# Altium schematic symbol library Diode%.SchLib: 376 symbols (part 1 of 9)
Pins are listed as number, name and electrical type; pins without a type are passive.

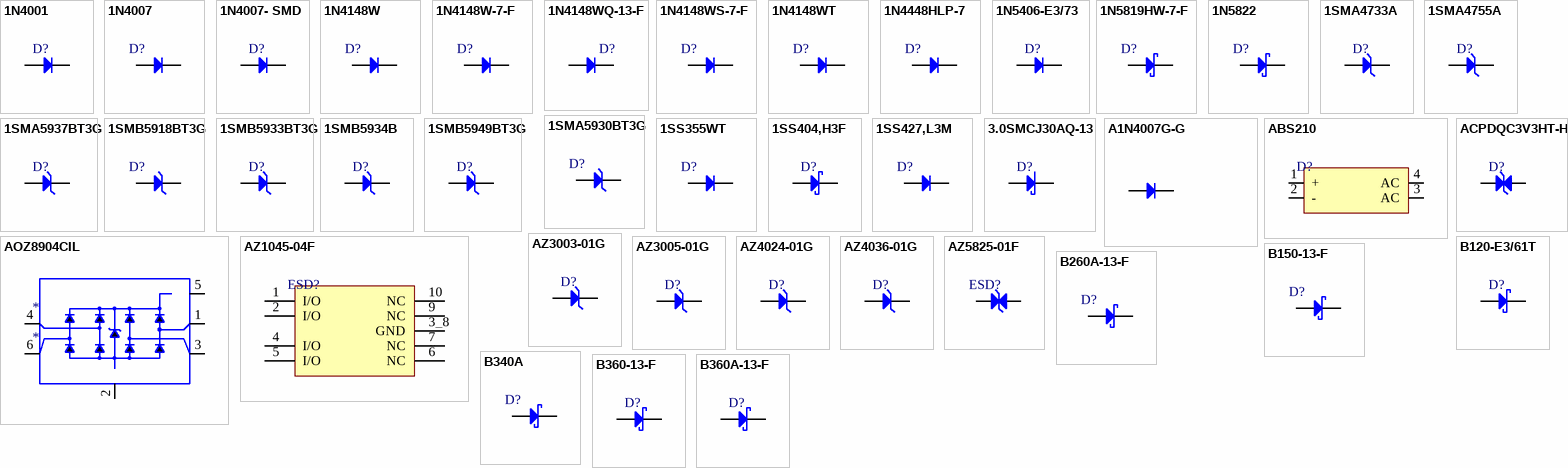
[diagram p0: symbols 1N4001 to B360A-13-F]

## 1N4001
designator D?
1A Single 50V 1.1V@1A SMA(DO-214AC) Diodes - General Purpose ROHS; Manufacturer: TWGMC; Manufacturer Part Number: 1N4001; Item Type: Diode; Package: SMA(DO-214AC); LCSC Part Number: C727079; ComponentLink1Description: LCSC; ComponentLink1URL: https://www.lcsc.com/product-detail/Diodes-General-Purpose_TWGMC-1N4001_C727079.html
footprint SMA(DO-214AC)
pins: 1 K, 2 A

## 1N4007
designator D?
1A 1000V 1.1V@2A DO-41 Diodes - General Purpose ROHS; Manufacturer: JUXING; Manufacturer Part Number: 1N4007; Item Type: Diode; Package: DO-41; LCSC Part Number: C3011149; ComponentLink1Description: LCSC; ComponentLink1URL: https://www.lcsc.com/product-detail/Diodes-General-Purpose_JUXING-1N4007_C3011149.html
footprint DO-41
pins: 1 A, 2 K

## 1N4007- SMD
designator D?
1A Single 1kV 1.1V@1A SMA(DO-214AC) Diodes - General Purpose ROHS; Manufacturer: TWGMC; Manufacturer Part Number: 1N4007; Item Type: Diode; Package: SMA(DO-214AC); LCSC Part Number: C727081; ComponentLink1Description: LCSC; ComponentLink1URL: https://www.lcsc.com/product-detail/Diodes-General-Purpose_TWGMC-1N4007_C727081.html
footprint SMA(DO-214AC)
pins: 1 K, 2 A

## 1N4148W
designator D?
100V 400mW Single 1.25V@150mA 8ns 300mA SOD-123 Switching Diode ROHS; Manufacturer: JSMSEMI; Manufacturer Part Number: 1N4148W; ComponentLink1Description: LCSC; ComponentLink1URL: https://www.lcsc.com/product-detail/Switching-Diode_JSMSEMI-1N4148W_C917030.html; Package: SOD-123; LCSC Part Number: C917030; Item Type: Diode
footprint SOD-123
pins: 1 A, 2 K

## 1N4148W-7-F
designator D?
DIODE GEN PURP 100V 300MA SOD123; Manufacturer: Diodes; Manufacturer Part Number: 1N4148W-7-F; Forward Current: 150mA; Reverse Recovery Time: 4ns; Max Forward Surge Current (Ifsm): 2A; Element Configuration: Single; Max Reverse Current: 1uA; Forward Voltage: 1.25V; Power Dissipation: 400mW; Polarity: Standard; Voltage Rating (DC): 75V; Value: 2pF; Supplier 1: Future Electronics; RoHS: Yes; Category: Rectifier Diodes; Stock 1: 32931000; Pricing 1: 3000=0.01840, 12000=0.01760, 45000=0.01690, 120000=0.01640, 300000=0.01560 (USD); Mounting Technology: Surface Mount; Pins: 2; Weight: 0.000353oz; Contact Plating: Tin,Matte; Min Operating Temperature: -65°C; Max Operating Temperature: 150°C; Packaging: Tape and Reel; Max Repetitive Reverse Voltage (Vrrm): 100V; Peak Non-Repetitive Surge Current: 2A; Voltage: 100V; Max Surge Current: 2A; Package Quantity: 3000; Recovery Time: 4ns; Average Rectified Current: 300mA; Power Rating: 400mW; Current Rating: 150mA; Output Current: 150mA; Max Reverse Voltage (DC): 100V; Series: -; Reverse Recovery Time-Max: 4ns; Length: 2.85mm; Width: 1.7mm; Height: 1.25mm; Radiation Hardening: No; RoHS Compliant: Yes; Reach SVHC Compliant: Yes; Lead Free: Lead Free; ComponentLink1URL: https://datasheet.ciiva.com/1179/1915529-1179304.pdf?src-supplier=Element14; ComponentLink1Description: https://datasheet.ciiva.com/1179/1915529-1179304.pdf?src-supplier=Element14; ComponentLink2URL: https://datasheet.ciiva.com/22695/1915529-22695239.pdf?src-supplier=Element14; ComponentLink2Description: https://datasheet.ciiva.com/22695/1915529-22695239.pdf?src-supplier=Element14; ComponentLink3URL: https://datasheet.ciiva.com/8300/ds30086-8300392.pdf?src-supplier=Avnet; ComponentLink3Description: https://datasheet.ciiva.com/8300/ds30086-8300392.pdf?src-supplier=Avnet; ComponentLink4URL: https://datasheet.ciiva.com/15219/getdatasheetpartid-110030-15219548.pdf?src-supplier=Verical; ComponentLink4Description: https://datasheet.ciiva.com/15219/getdatasheetpartid-110030-15219548.pdf?src-supplier=Verical; ComponentLink5URL: https://datasheet.ciiva.com/8303/ds30086-8303197.pdf?src-supplier=Avnet; ComponentLink5Description: https://datasheet.ciiva.com/8303/ds30086-8303197.pdf?src-supplier=Avnet; ComponentLink6URL: https://datasheet.ciiva.com/911/ds30086-911735.pdf?src-supplier=Digi-Key; ComponentLink6Description: https://datasheet.ciiva.com/911/ds30086-911735.pdf?src-supplier=Digi-Key; ComponentLink7URL: https://datasheet.ciiva.com/911/ds30086-911736.pdf?src-supplier=Digi-Key; ComponentLink7Description: https://datasheet.ciiva.com/911/ds30086-911736.pdf?src-supplier=Digi-Key; ComponentLink8URL: https://datasheet.ciiva.com/911/ds30086-911734.pdf?src-supplier=Digi-Key; ComponentLink8Description: https://datasheet.ciiva.com/911/ds30086-911734.pdf?src-supplier=Digi-Key; ComponentLink9URL: https://datasheet.ciiva.com/4435/ds30086-4435128.pdf?src-supplier=Mouser; ComponentLink9Description: https://datasheet.ciiva.com/4435/ds30086-4435128.pdf?src-supplier=Mouser; Supplier Part Number 1: 7634694; LCSC Part Number: C83528; Item Type: Diode
footprint SOD-123
pins: 1 A, 2 K

## 1N4148WQ-13-F
designator D?
DIODE GP 100V 300MA SOD123 10K; Item Type: DIODE; ComponentLink1Description: LCSC; Supplier: Future Electronics; Supplier Part Number: 5129355; RoHS: Yes; Category: Rectifier Diodes; Stock: 20000; Pricing: 10000=0.0247, 30000=0.0239, 40000=0.0236, 100000=0.023, 150000=0.0223 (USD); RoHS Compliant: Yes
footprint SOD-123
pins: 1 A, 2 K

## 1N4148WS-7-F
designator D?
DIODE GEN PURP 75V 150MA SOD323; Manufacturer: Diodes; Manufacturer Part Number: 1N4148WS-7-F; Forward Current: 300mA; Reverse Recovery Time: 4ns; Element Configuration: Single; Forward Voltage: 1.25V; Max Reverse Current: 1uA; Peak Non-Repetitive Surge Current: 2A; Power Dissipation: 200mW; Polarity: Standard; Capacitance: 2pF; Supplier 1: Mouser; RoHS: Yes; Category: Rectifier Diodes; Pricing 1: 1=0.19000, 10=0.17500, 50=0.17500, 100=0.09600, 500=0.05900, 1000=0.04000, 3000=0.03000, 9000=0.02600, 10000=0.02600, 24000=0.02300, 45000=0.01900 (USD); Mount: Surface Mount; Number of Pins: 2; Weight: 0.000173oz; Contact Plating: Tin,Matte; Min Operating Temperature: -65°C; Max Operating Temperature: 150°C; Max Repetitive Reverse Voltage (Vrrm): 75V; Max Forward Surge Current (Ifsm): 2A; Max Surge Current: 2A; Packaging: Tape and Reel; Recovery Time: 4ns; Package Quantity: 3000; Average Rectified Current: 150mA; Voltage Rating (DC): 75V; Power Rating: 200mW; Current Rating: 150mA; Output Current: 150mA; Voltage: 75V; Max Reverse Voltage (DC): 75V; Series: -; Reverse Recovery Time-Max: 4ns; Length: 1.8mm; Width: 1.4mm; Height: 1mm; Radiation Hardening: No; REACH SVHC: No SVHC; Lead Free: Lead Free; RoHS Compliant: Yes; ComponentLink1URL: https://datasheet.ciiva.com/1179/ds30097-1179355.pdf?src-supplier=Element14; ComponentLink1Description: https://datasheet.ciiva.com/1179/ds30097-1179355.pdf?src-supplier=Element14; ComponentLink2URL: https://datasheet.ciiva.com/8300/ds30097-8300396.pdf?src-supplier=Avnet; ComponentLink2Description: https://datasheet.ciiva.com/8300/ds30097-8300396.pdf?src-supplier=Avnet; ComponentLink3URL: https://datasheet.ciiva.com/16199/ds30097-16199061.pdf?src-supplier=Future+Electronics; ComponentLink3Description: https://datasheet.ciiva.com/16199/ds30097-16199061.pdf?src-supplier=Future+Electronics; ComponentLink4URL: https://datasheet.ciiva.com/911/ds30097-911742.pdf?src-supplier=Digi-Key; ComponentLink4Description: https://datasheet.ciiva.com/911/ds30097-911742.pdf?src-supplier=Digi-Key; ComponentLink5URL: https://datasheet.ciiva.com/911/ds30097-911743.pdf?src-supplier=Digi-Key; ComponentLink5Description: https://datasheet.ciiva.com/911/ds30097-911743.pdf?src-supplier=Digi-Key; ComponentLink6URL: https://datasheet.ciiva.com/911/ds30097-911741.pdf?src-supplier=Digi-Key; ComponentLink6Description: https://datasheet.ciiva.com/911/ds30097-911741.pdf?src-supplier=Digi-Key; Supplier Part Number 1: 621-1N4148WS-F; LCSC Part Number: C60580; Item Type: Diode
footprint SOD-323 (40V 600mV@1A 1A SOD-323 Schottky Barrier Diodes (SBD))
pins: 1 K, 2 A

## 1N4148WT
designator D?
DIODE GEN PURP 75V 200MA SOD523F; Manufacturer: ON Semiconductor / Fairchild; Manufacturer Part Number: 1N4148WT; Recovery Time: 4ns; Forward Current: 300mA; Max Reverse Current: 5uA; Power Dissipation: 200mW; Max Forward Surge Current (Ifsm): 4A; Element Configuration: Single; Supplier 1: Future Electronics; RoHS: Yes; Category: Rectifier Diodes; Stock 1: 30; Pricing 1: 1=0.0305, 20=0.0267, 125=0.0246, 750=0.0227, 4000=0.0204 (USD); Mounting Technology: Surface Mount; Pins: 2; Weight: 0.01g; Contact Plating: Tin,Matte; Min Operating Temperature: -55°C; Max Operating Temperature: 150°C; Packaging: Tape and Reel; Package Quantity: 1; Series: -; Reverse Recovery Time: 4ns; Max Repetitive Reverse Voltage (Vrrm): 75V; Average Rectified Current: 200mA; Max Reverse Voltage (DC): 75V; Reverse Recovery Time-Max: 4ns; Length: 1.3mm; Width: 0.9mm; Height: 0.7mm; Radiation Hardening: No; RoHS Compliant: Yes; Lead Free: Lead Free; Reach SVHC Compliant: No; ComponentLink1URL: https://datasheet.ciiva.com/16744/1n4148wt-16744972.pdf?src-supplier=Future+Electronics; ComponentLink1Description: https://datasheet.ciiva.com/16744/1n4148wt-16744972.pdf?src-supplier=Future+Electronics; ComponentLink2URL: https://datasheet.ciiva.com/30479/0900766b810e1cd4-30479226.pdf?src-supplier=Rs; ComponentLink2Description: https://datasheet.ciiva.com/30479/0900766b810e1cd4-30479226.pdf?src-supplier=Rs; ComponentLink3URL: https://datasheet.ciiva.com/15208/getdatasheetpartid-146392-15208359.pdf?src-supplier=Verical; ComponentLink3Description: https://datasheet.ciiva.com/15208/getdatasheetpartid-146392-15208359.pdf?src-supplier=Verical; ComponentLink4URL: https://datasheet.ciiva.com/916/1n914bwt-916865.pdf?src-supplier=Digi-Key; ComponentLink4Description: https://datasheet.ciiva.com/916/1n914bwt-916865.pdf?src-supplier=Digi-Key; ComponentLink5URL: https://datasheet.ciiva.com/916/1n914bwt-916866.pdf?src-supplier=Digi-Key; ComponentLink5Description: https://datasheet.ciiva.com/916/1n914bwt-916866.pdf?src-supplier=Digi-Key; ComponentLink6URL: https://datasheet.ciiva.com/916/1n914bwt-916864.pdf?src-supplier=Digi-Key; ComponentLink6Description: https://datasheet.ciiva.com/916/1n914bwt-916864.pdf?src-supplier=Digi-Key; Supplier Part Number 1: 6145918; LCSC Part Number: C232841; Item Type: Diode
footprint SOD-523F
pins: 1 A, 2 K

## 1N4448HLP-7
designator D?
80V -65℃~+150℃@(Tj) 250mW Single 1.25V@150mA 4ns 100nA@80V 95mA X1-DFN1006-2 Switching Diode ROHS; Manufacturer: Diodes Incorporated; Manufacturer Part Number: 1N4448HLP-7; ComponentLink1Description: LCSC; ComponentLink1URL: https://www.lcsc.com/product-detail/Switching-Diode_Diodes-Incorporated-1N4448HLP-7_C154874.html; Package: X1-DFN1006-2; LCSC Part Number: C154874; Item Type: Diode
footprint DFN1006-2L_
pins: 1 K, 2 A

## 1N5406-E3/73
designator D?
DIODE GEN PURP 600V 3A DO201AD; Manufacturer: Vishay Semiconductors; Manufacturer Part Number: 1N5406-E3/73; Max Reverse Current: 5uA; Max Surge Current: 200A; Supplier: Mouser; LCSC Part Number: C467496; RoHS: Yes; Item Type: Diode; Stock: 23612; Pricing: 1=0.53, 10=0.453, 50=0.453, 100=0.315, 1000=0.214, 10000=0.16 (USD); Mounting Technology: Through Hole; Case/Package: DO-201AD; Contact Plating: Tin,Matte; Min Operating Temperature: -50°C; Max Operating Temperature: 150°C; Forward Current: 3A; Package Quantity: 1000; Packaging: Tape and Reel; Average Rectified Current: 3A; Max Repetitive Reverse Voltage (Vrrm): 600V; Peak Non-Repetitive Surge Current: 200A; Max Reverse Voltage (DC): 600V; Reverse Voltage: 600V; Series: -; Radiation Hardening: No; ComponentLink1URL: http://www.mouser.com/ds/2/427/1n5400-240276.pdf?src-supplier=Mouser; ComponentLink1Description: http://www.mouser.com/ds/2/427/1n5400-240276.pdf?src-supplier=Mouser; ComponentLink2URL: http://www.vishay.com/docs/88516/1n5400.pdf?src-supplier=Digikey; ComponentLink2Description: http://www.vishay.com/docs/88516/1n5400.pdf?src-supplier=Digikey; ComponentLink3URL: http://www.vishay.com/docs/88516/1n5400.pdf?src-supplier=Avnet; ComponentLink3Description: http://www.vishay.com/docs/88516/1n5400.pdf?src-supplier=Avnet
footprint DO-201AD
pins: 1 K, 2 A

## 1N5819HW-7-F
designator D?
DIODE SCHOTTKY 40V 1A SOD123; Manufacturer: Diodes; Manufacturer Part Number: 1N5819HW-7-F; Forward Voltage: 450mV; Max Reverse Current: 50uA; Element Configuration: Single; Max Forward Surge Current (Ifsm): 25A; Max Power Dissipation: 450mW; Polarity: Standard; Capacitance: 110pF; Supplier 1: Digi-Key; RoHS: Yes; Category: Schottky Diodes; Pricing 1: 1=0.46000, 10=0.34500, 100=0.19530, 500=0.12936, 1000=0.09918 (USD); Case/Package: SOD-123-2; Number of Pins: 2; Weight: 0.000353oz; Contact Plating: Tin,Matte; Min Operating Temperature: -65°C; Max Operating Temperature: 125°C; Forward Current: 1A; Max Repetitive Reverse Voltage (Vrrm): 40V; Packaging: Tape and Reel; Peak Non-Repetitive Surge Current: 25A; Package Quantity: 3000; Average Rectified Current: 1A; Termination: SMD/SMT; Voltage Rating (DC): 40V; Current Rating: 1A; Output Current: 1A; Max Reverse Voltage (DC): 40V; Series: -; Length: 2.85mm; Width: 1.7mm; Height: 1.25mm; Radiation Hardening: No; RoHS Compliant: Yes; REACH SVHC: No SVHC; Lead Free: Lead Free; ComponentLink1URL: https://datasheet.ciiva.com/16303/ds30217-16303296.pdf?src-supplier=Future+Electronics; ComponentLink1Description: https://datasheet.ciiva.com/16303/ds30217-16303296.pdf?src-supplier=Future+Electronics; ComponentLink2URL: https://datasheet.ciiva.com/27092/1538419-27092484.pdf?src-supplier=Jameco; ComponentLink2Description: https://datasheet.ciiva.com/27092/1538419-27092484.pdf?src-supplier=Jameco; ComponentLink3URL: https://datasheet.ciiva.com/912/ds30217-912801.pdf?src-supplier=Digi-Key; ComponentLink3Description: https://datasheet.ciiva.com/912/ds30217-912801.pdf?src-supplier=Digi-Key; ComponentLink4URL: https://datasheet.ciiva.com/1177/ds30217-1177089.pdf?src-supplier=Element14; ComponentLink4Description: https://datasheet.ciiva.com/1177/ds30217-1177089.pdf?src-supplier=Element14; ComponentLink5URL: https://datasheet.ciiva.com/912/ds30217-912802.pdf?src-supplier=Digi-Key; ComponentLink5Description: https://datasheet.ciiva.com/912/ds30217-912802.pdf?src-supplier=Digi-Key; ComponentLink6URL: https://datasheet.ciiva.com/912/ds30217-912803.pdf?src-supplier=Digi-Key; ComponentLink6Description: https://datasheet.ciiva.com/912/ds30217-912803.pdf?src-supplier=Digi-Key; ComponentLink7URL: https://datasheet.ciiva.com/8303/ds30217-8303132.pdf?src-supplier=Avnet; ComponentLink7Description: https://datasheet.ciiva.com/8303/ds30217-8303132.pdf?src-supplier=Avnet; ComponentLink8URL: https://datasheet.ciiva.com/25919/ds30217-25919644.pdf?src-supplier=Avnet+Europe; ComponentLink8Description: https://datasheet.ciiva.com/25919/ds30217-25919644.pdf?src-supplier=Avnet+Europe; Supplier Part Number 1: 1N5819HW-FDICT-ND; LCSC Part Number: C82544; Item Type: Diode
footprint SOD-123
pins: 1 A, 2 K

## 1N5822
designator D?
40V 3A 525mV@3A DO-201AD Schottky Barrier Diodes (SBD) ROHS; Manufacturer: FUXINSEMI; Manufacturer Part Number: 1N5822; Item Type: Diode; Package: DO-201AD; LCSC Part Number: C3018526; ComponentLink1Description: LCSC; ComponentLink1URL: https://www.lcsc.com/product-detail/Schottky-Barrier-Diodes-SBD_FUXINSEMI-1N5822_C3018526.html
footprint DO-201AD
pins: 1 K, 2 A

## 1SMA4733A
designator D?
Independent Type 4.84V~5.36V 1W 5.1V SMA Zener Diodes ROHS; Manufacturer: Shandong Jingdao Microelectronics; Manufacturer Part Number: 1SMA4733A; Item Type: Diode; Package: SMA; LCSC Part Number: C382953; ComponentLink1Description: LCSC; ComponentLink1URL: https://www.lcsc.com/product-detail/Zener-Diodes_Shandong-Jingdao-Microelectronics-1SMA4733A_C382953.html
footprint SMA
pins: 1 K, 2 A

## 1SMA4755A
designator D?
Independent Type 40.9V~45.6V 1W 43V SMA Zener Diodes ROHS; Manufacturer: Shandong Jingdao Microelectronics; Manufacturer Part Number: 1SMA4755A; Item Type: Diode; Package: SMA; LCSC Part Number: C438373; ComponentLink1Description: LCSC; ComponentLink1URL: https://www.lcsc.com/product-detail/Zener-Diodes_Shandong-Jingdao-Microelectronics-1SMA4755A_C438373.html
footprint SMA
pins: 1 K, 2 A

## 1SMA5930BT3G
designator D?
DIODE ZENER 16V 1.5W SMA; Manufacturer: onsemi; Manufacturer Part Number: 1SMA5930BT3G; Item Type: Zener diode; Package: SMA; LCSC Part Number: C128848; ComponentLink1Description: LCSC; ComponentLink1URL: https://www.lcsc.com/product-detail/Zener-Diodes_onsemi-1SMA5930BT3G_C128848.html
footprint SMA
pins: 1 K, 2 A

## 1SMA5937BT3G
designator D?
DIODE ZENER 33V 1.5W SMA; Manufacturer: ON Semiconductor; Manufacturer Part Number: 1SMA5937BT3G; Supplier: Rs; Supplier Part Number: 7925363; RoHS: Yes; Category: Zener Diodes; Stock: 3380; Pricing: 20=0.231, 100=0.164, 200=0.159, 400=0.154, 800=0.152 (GBP); ComponentLink1URL: https://datasheet.ciiva.com/30478/0900766b8127698c-30478606.pdf?src-supplier=Rs; ComponentLink1Description: https://datasheet.ciiva.com/30478/0900766b8127698c-30478606.pdf?src-supplier=Rs; ComponentLink2URL: https://datasheet.ciiva.com/1182/1sma5913bt3-d-1182598.pdf?src-supplier=Element14; ComponentLink2Description: https://datasheet.ciiva.com/1182/1sma5913bt3-d-1182598.pdf?src-supplier=Element14; ComponentLink3URL: https://datasheet.ciiva.com/1182/1sma5913bt3-d-1182599.pdf?src-supplier=Element14; ComponentLink3Description: https://datasheet.ciiva.com/1182/1sma5913bt3-d-1182599.pdf?src-supplier=Element14; Item Type: Diode
footprint SMA
pins: 1 K, 2 A

## 1SMB5918BT3G
designator D?
DIODE ZENER 5.1V 3W SMB; Manufacturer: ON Semiconductor; Manufacturer Part Number: 1SMB5918BT3G; Material: Plastic; Forward Voltage: 1.5V; Tolerance: 5%; Impedance: 4R; Max Reverse Leakage Current: 5uA; Zener Current: 294mA; Element Configuration: Single; Breakdown Voltage: 5.36V; Power Dissipation: 550mW; Test Current: 73.5mA; ESD Protection: Yes; Supplier 1: Digi-Key; RoHS: Yes; Category: Zener Diodes; Pricing 1: 1=0.47000, 10=0.35700, 100=0.22230, 500=0.15214, 1000=0.11702 (USD); Case/Package: SMB; Pins: 2; Contact Plating: Tin,Matte; Min Operating Temperature: -65°C; Max Operating Temperature: 150°C; Packaging: Tape and Reel; Max Power Dissipation: 3W; Package Quantity: 2500; Zener Voltage: 5.1V; Voltage Tolerance: 5%; Max Reverse Current: 5uA; Voltage Rating (DC): 5.1V; Power Rating: 3W; Series: -; Working Voltage: 5.1V; Length: 4.32mm; Width: 3.56mm; Height: 2.13mm; Radiation Hardening: No; Lead Free: Lead Free; Halogen Free: Halogen Free; Reach SVHC Compliant: Yes; RoHS Compliant: Yes; ComponentLink1URL: https://datasheet.ciiva.com/43573/1308322-43573724.pdf?src-supplier=Jameco; ComponentLink1Description: https://datasheet.ciiva.com/43573/1308322-43573724.pdf?src-supplier=Jameco; ComponentLink2URL: https://datasheet.ciiva.com/1182/1smb5913bt3-d-1182656.pdf?src-supplier=Element14; ComponentLink2Description: https://datasheet.ciiva.com/1182/1smb5913bt3-d-1182656.pdf?src-supplier=Element14; ComponentLink3URL: https://datasheet.ciiva.com/1182/1smb5913bt3-d-1182655.pdf?src-supplier=Element14; ComponentLink3Description: https://datasheet.ciiva.com/1182/1smb5913bt3-d-1182655.pdf?src-supplier=Element14; ComponentLink4URL: https://datasheet.ciiva.com/15198/getdatasheetpartid-301256-15198694.pdf?src-supplier=Verical; ComponentLink4Description: https://datasheet.ciiva.com/15198/getdatasheetpartid-301256-15198694.pdf?src-supplier=Verical; ComponentLink5URL: https://datasheet.ciiva.com/895/1smb5913bt3-d-895174.pdf?src-supplier=Digi-Key; ComponentLink5Description: https://datasheet.ciiva.com/895/1smb5913bt3-d-895174.pdf?src-supplier=Digi-Key; ComponentLink6URL: https://datasheet.ciiva.com/895/1smb5913bt3-d-895175.pdf?src-supplier=Digi-Key; ComponentLink6Description: https://datasheet.ciiva.com/895/1smb5913bt3-d-895175.pdf?src-supplier=Digi-Key; ComponentLink7URL: https://datasheet.ciiva.com/895/1smb5913bt3-d-895173.pdf?src-supplier=Digi-Key; ComponentLink7Description: https://datasheet.ciiva.com/895/1smb5913bt3-d-895173.pdf?src-supplier=Digi-Key; ComponentLink8URL: https://datasheet.ciiva.com/28461/1571994-28461349.pdf?src-supplier=Element14; ComponentLink8Description: https://datasheet.ciiva.com/28461/1571994-28461349.pdf?src-supplier=Element14; ComponentLink9URL: https://datasheet.ciiva.com/14559/70099466-14559627.pdf?src-supplier=Allied+Electronics; ComponentLink9Description: https://datasheet.ciiva.com/14559/70099466-14559627.pdf?src-supplier=Allied+Electronics; Supplier Part Number 1: 1SMB5918BT3GOSDKR-ND; LCSC Part Number: C142361; Item Type: Diode
footprint SMB_
pins: 1 A, 2 K

## 1SMB5933BT3G
designator D?
DIODE ZENER 22V 3W SMB; Manufacturer: ON Semiconductor; Manufacturer Part Number: 1SMB5933BT3G; Supplier: Arrow Electronics; LCSC Part Number: C94390; RoHS: Yes; Item Type: Diode; Stock: 12500; Pricing: 2500=0.0718 (USD); ComponentLink1URL: https://datasheet.ciiva.com/15142/getdatasheetpartid-121124-15142811.pdf?src-supplier=Verical; ComponentLink1Description: https://datasheet.ciiva.com/15142/getdatasheetpartid-121124-15142811.pdf?src-supplier=Verical; ComponentLink2URL: https://datasheet.ciiva.com/18434/70099466-18434927.pdf?src-supplier=Allied+Electronics; ComponentLink2Description: https://datasheet.ciiva.com/18434/70099466-18434927.pdf?src-supplier=Allied+Electronics; ComponentLink3URL: https://datasheet.ciiva.com/16387/1smb5913bt3-d-16387115.pdf?src-supplier=Future+Electronics; ComponentLink3Description: https://datasheet.ciiva.com/16387/1smb5913bt3-d-16387115.pdf?src-supplier=Future+Electronics; ComponentLink4URL: https://datasheet.ciiva.com/900/1smb5913bt3-d-900446.pdf?src-supplier=Digikey; ComponentLink4Description: https://datasheet.ciiva.com/900/1smb5913bt3-d-900446.pdf?src-supplier=Digikey; ComponentLink5URL: https://datasheet.ciiva.com/900/1smb5913bt3-d-900447.pdf?src-supplier=Digikey; ComponentLink5Description: https://datasheet.ciiva.com/900/1smb5913bt3-d-900447.pdf?src-supplier=Digikey; ComponentLink6URL: https://datasheet.ciiva.com/900/1smb5913bt3-d-900448.pdf?src-supplier=Digikey; ComponentLink6Description: https://datasheet.ciiva.com/900/1smb5913bt3-d-900448.pdf?src-supplier=Digikey
footprint SMB_
pins: 1 A, 2 K

## 1SMB5934B
designator D?
3W 24V SMB Zener Diodes ROHS; Manufacturer: YFW; Manufacturer Part Number: 1SMB5934B; Item Type: Diode; Package: SMB; LCSC Part Number: C2988044; ComponentLink1Description: LCSC; ComponentLink1URL: https://www.lcsc.com/product-detail/Zener-Diodes_YFW-1SMB5934B_C2988044.html
footprint SMB_
pins: 1 A, 2 K

## 1SMB5949BT3G
designator D?
DIODE ZENER 100V 3W SMB; Manufacturer: ON Semiconductor; Manufacturer Part Number: 1SMB5949BT3G; Item Type: Diodes; Supplier: Arrow Electronics; LCSC Part Number: C150045; RoHS: Yes; Stock: 10000; Pricing: 2500=0.0809 (USD); ComponentLink1URL: https://datasheet.ciiva.com/15142/getdatasheetpartid-53879-15142134.pdf?src-supplier=Verical; ComponentLink1Description: https://datasheet.ciiva.com/15142/getdatasheetpartid-53879-15142134.pdf?src-supplier=Verical; ComponentLink2URL: https://datasheet.ciiva.com/18434/70099466-18434616.pdf?src-supplier=Allied+Electronics; ComponentLink2Description: https://datasheet.ciiva.com/18434/70099466-18434616.pdf?src-supplier=Allied+Electronics; ComponentLink3URL: https://datasheet.ciiva.com/895/1smb5913bt3-d-895236.pdf?src-supplier=Digikey; ComponentLink3Description: https://datasheet.ciiva.com/895/1smb5913bt3-d-895236.pdf?src-supplier=Digikey; ComponentLink4URL: https://datasheet.ciiva.com/895/1smb5913bt3-d-895237.pdf?src-supplier=Digikey; ComponentLink4Description: https://datasheet.ciiva.com/895/1smb5913bt3-d-895237.pdf?src-supplier=Digikey; ComponentLink5URL: https://datasheet.ciiva.com/895/1smb5913bt3-d-895238.pdf?src-supplier=Digikey; ComponentLink5Description: https://datasheet.ciiva.com/895/1smb5913bt3-d-895238.pdf?src-supplier=Digikey; ComponentLink6URL: https://datasheet.ciiva.com/8346/1smb5913bt3-d-8346409.pdf?src-supplier=Avnet; ComponentLink6Description: https://datasheet.ciiva.com/8346/1smb5913bt3-d-8346409.pdf?src-supplier=Avnet
footprint SMB_
pins: 1 A, 2 K

## 1SS355WT
designator D?
80V Single 1.2V@100mA 4ns 100mA SOD-523 Switching Diode ROHS; Manufacturer: CBI; Manufacturer Part Number: 1SS355WT; Package: SOD-523; LCSC Part Number: C2836063; Item Type: Diode; ComponentLink1Description: LCSC; ComponentLink1URL: https://www.lcsc.com/product-detail/Switching-Diode_CBI-1SS355WT_C2836063.html
footprint SOD-523 (SOD-523 Schottky Barrier Diodes (SBD) ROHS)
pins: 1 A, 2 K

## 1SS404,H3F
designator D?
Diode Schottky Barrier 25V 0.3A 2 SOD-323; Manufacturer: Toshiba; Manufacturer Part Number: 1SS404,H3F; Average Rectified Current: 300mA; Max Reverse Voltage (DC): 20V; Supplier 1: Avnet; RoHS: No; Category: Rectifier Diodes; Stock 1: 36000; Pricing 1: 3000=0.01778, 6000=0.01748, 12000=0.01718, 18000=0.01688, 24000=0.01658 (USD); Mount: Surface Mount; Case/Package: SOD; Contact Plating: Tin,Silver; Min Operating Temperature: -40°C; Max Operating Temperature: 100°C; Packaging: Cut Tape; Forward Current: 300mA; Max Repetitive Reverse Voltage (Vrrm): 25V; Series: -; ComponentLink1URL: https://datasheet.ciiva.com/45259/dst-1ss404-tde-en-1850-45259189.pdf?src-supplier=Digikey; ComponentLink1Description: https://datasheet.ciiva.com/45259/dst-1ss404-tde-en-1850-45259189.pdf?src-supplier=Digikey; ComponentLink2URL: https://datasheet.ciiva.com/45259/dst-1ss404-tde-en-1850-45259190.pdf?src-supplier=Digikey; ComponentLink2Description: https://datasheet.ciiva.com/45259/dst-1ss404-tde-en-1850-45259190.pdf?src-supplier=Digikey; ComponentLink3URL: https://datasheet.ciiva.com/45259/dst-1ss404-tde-en-1850-45259191.pdf?src-supplier=Digikey; ComponentLink3Description: https://datasheet.ciiva.com/45259/dst-1ss404-tde-en-1850-45259191.pdf?src-supplier=Digikey; Supplier Part Number 1: 1SS404,H3F; Item Type: Diode; LCSC Part Number: C146358
footprint USC
pins: 1 K, 2 A

## 1SS427,L3M
designator D?
DIODE GEN PURP 80V 100MA SOD923; Manufacturer: Toshiba; Manufacturer Part Number: 1SS427,L3M; Reverse Recovery Time: 1.6ns; Max Repetitive Reverse Voltage (Vrrm): 85V; Peak Non-Repetitive Surge Current: 1A; Item Type: Switching Diode; Supplier 1: Arrow Electronics; RoHS: Yes; Category: Rectifier Diodes; Stock 1: 22801; Pricing 1: 1=0.2509, 10=0.2033, 25=0.2013, 100=0.1061, 250=0.105, 500=0.0686, 1000=0.0432, 3000=0.0383, 6000=0.0352, 15000=0.0296 (USD); Mounting Technology: Surface Mount; Case/Package: SOD; Min Operating Temperature: -55°C; Max Operating Temperature: 150°C; Packaging: Cut Tape; Forward Current: 100mA; Average Rectified Current: 100mA; Max Reverse Voltage (DC): 80V; Series: -; RoHS Compliant: Yes; ComponentLink1URL: http://www.mouser.com/ds/2/408/1SS427_datasheet_en_20140708-708354.pdf?src-supplier=Mouser; ComponentLink1Description: http://www.mouser.com/ds/2/408/1SS427_datasheet_en_20140708-708354.pdf?src-supplier=Mouser; ComponentLink2URL: https://toshiba.semicon-storage.com/info/docget.jsp?did=11149&prodName=1SS427&src-supplier=Digi-Key; ComponentLink2Description: https://toshiba.semicon-storage.com/info/docget.jsp?did=11149&prodName=1SS427&src-supplier=Digi-Key; ComponentLink3URL: https://www.toshiba.com/taec/components2/datasheet_Sync/200802/DST_1SS427-TDE_EN_27790.pdf?src-supplier=Avnet; ComponentLink3Description: https://www.toshiba.com/taec/components2/datasheet_Sync/200802/DST_1SS427-TDE_EN_27790.pdf?src-supplier=Avnet; Supplier Part Number 1: 1SS427,L3M; LCSC Part Number: C146351
footprint SOD-923.
pins: 1 K, 2 A

## 3.0SMCJ30AQ-13
designator D?
TVS DIODE 30VWM 48.4VC SMC; Manufacturer: Diodes; Manufacturer Part Number: 3.0SMCJ30AQ-13; Number of Unidirectional Channels: 1; Reverse Standoff Voltage: 30V; Min Breakdown Voltage: 33.3V; Peak Pulse Current: 62A; Peak Pulse Power: 3kW; Power Line Protection: Yes; Diode Type: ZENER; Supplier: Digikey; Supplier Part Number: 3.0SMCJ30AQ-13-ND; RoHS: Yes; Category: TVS Diodes; Pricing: 3000=0.66437, 6000=0.63274, 9000=0.60353 (USD); Mounting Technology: Surface Mount; Case/Package: SMC; Min Operating Temperature: -55°C; Max Operating Temperature: 175°C; Packaging: Tape and Reel; Series: Automotive, AEC-Q101; RoHS Compliant: Yes; ComponentLink1URL: https://www.diodes.com/assets/product-showcases/Automotive-Grade-SMAJ-SMBJ-SMCJ-3.0SMCJ-TVS-Diodes-NPA-112018.pdf?src-supplier=Digikey; ComponentLink1Description: https://www.diodes.com/assets/product-showcases/Automotive-Grade-SMAJ-SMBJ-SMCJ-3.0SMCJ-TVS-Diodes-NPA-112018.pdf?src-supplier=Digikey; Item Type: Diode
footprint SMC
pins: 1 K, 2 A

## A1N4007G-G
designator D?
DIODE GEN PURP 1KV 1A DO41; Item Type: Diode; ComponentLink1Description: LCSC; Supplier: Arrow Electronics; Supplier Part Number: A1N4007G-G; RoHS: Yes; Stock: 15000; Pricing: 5000=0.0435, 10000=0.038, 50000=0.0355, 100000=0.035 (USD); Mounting Technology: Through Hole; Case/Package: DO-41; Packaging: Cut Tape; Average Rectified Current: 1A; Max Reverse Voltage (DC): 1kV; Series: Automotive, AEC-Q101; RoHS Compliant: Yes; ComponentLink2URL: http://www.comchiptech.com/cms/UserFiles/A1N4007G-G%20RevA105058.pdf?src-supplier=Digi-Key; ComponentLink2Description: http://www.comchiptech.com/cms/UserFiles/A1N4007G-G%20RevA105058.pdf?src-supplier=Digi-Key
footprint DO-41
pins: 1 A, 2 K

## ABS210
designator D?
50A 2A 1kV ABS Bridge Rectifiers ROHS; Manufacturer: MDD(Microdiode Semiconductor); Manufacturer Part Number: ABS210; LCSC Part Number: C113925; Package: ABS; Item Type: Bridge Rectifier
footprint ABS
pins: 1 +, 2 -, 3 AC, 4 AC

## ACPDQC3V3HT-HF
designator D?
AUTOMOTIVE DIODE ESD 3.3VWM 5.5V; Manufacturer: Comchip; Manufacturer Part Number: ACPDQC3V3HT-HF; Supplier: Digikey; Supplier Part Number: 641-ACPDQC3V3HT-HFCT-ND; RoHS: No; Stock: 4462; Pricing: 1=0.37, 10=0.255, 100=0.1244, 500=0.10378, 1000=0.07211, 2000=0.0625 (USD); Item Type: Diode
footprint Diode 0402
pins: 1 A, 2 A

## AOZ8904CIL
designator *
Ultra-Low Capacitance TVS Diode Array, SOT-23-6L, RoHS; Manufacturer: Alpha & Omega Semiconductor; Manufacturer Part Number: AOZ8904CIL; Direction: Unidirectional; Number of Bidirectional Channels: 4; Reverse Standoff Voltage: 5.5V; Min Breakdown Voltage: 6.6V; Clamping Voltage: 18V; Peak Pulse Power: 50W; Power Line Protection: Yes; Leakage Current: 1uA; Peak Pulse Current: 4A; Item Type: IC; Supplier: Digikey; Supplier Part Number: 785-1755-1-ND; RoHS: Yes; Category: TVS Diodes; Stock: 1165949; Pricing: 1=0.34, 10=0.235, 100=0.1187, 500=0.09684, 1000=0.07185 (USD); Mounting Technology: Surface Mount; Case/Package: SOT-23-6; Pins: 6; Min Operating Temperature: -40°C; Max Operating Temperature: 125°C; Packaging: Tape and Reel; Package Quantity: 6000; Working Voltage: 5.5V; Series: -; Number of Unidirectional Channels: 4; Length: 2.9mm; Depth: 1.6mm; Radiation Hardening: No; RoHS Compliant: Yes; ComponentLink1URL: https://datasheet.ciiva.com/6575/aoz8904cil-6575149.pdf?src-supplier=Digikey; ComponentLink1Description: https://datasheet.ciiva.com/6575/aoz8904cil-6575149.pdf?src-supplier=Digikey; Package: SOT-23-6; JLCPCB Part Number: C2649893; ComponentLink2Description: JLCPCB; ComponentLink2URL: https://jlcpcb.com/partdetail/Alpha_OmegaSemicon-AOZ8904CIL/C2649893
footprint SOT-23-6
pins: 1 CH1, 2 VN, 3 CH2, 4 CH3, 5 VP, 6 CH4

## AZ1045-04F
designator ESD?
DFN2510-10 Electrostatic and Surge Protection (TVS/ESD) ROHS; Manufacturer: TECH PUBLIC; Manufacturer Part Number: AZ1045-04F; Item Type: Diode; ComponentLink1Description: LCSC; ComponentLink1URL: https://www.lcsc.com/product-detail/Electrostatic-and-Surge-Protection-TVS-ESD_TECH-PUBLIC-AZ1045-04F_C2987152.html; Footprint: AZ1045-04F; LCSC Part Number: C2987152
footprint AZ1045-04F
pins: 1 I/O, 2 I/O, 3_8 GND, 4 I/O, 5 I/O, 6 NC, 7 NC, 9 NC, 10 NC

## AZ3003-01G
designator D?
TVS SURGE PROTECTOR 1-CH 3.3V; Manufacturer: Amazing; Manufacturer Part Number: AZ3003-01G; Item Type: Diode; Package: SOD-123; LCSC Part Number: -; ComponentLink1Description: Digikey; ComponentLink1URL: https://www.digikey.com/en/products/detail/amazing/AZ3003-01G/16615352?s=N4IgTCBcDaIIIC0DMAGFSC0KCMBxEAugL5A
footprint SOD-123
pins: 1 A, 2 K

## AZ3005-01G
designator D?
6V 5V SOD-123 ESD and Surge Protection (TVS/ESD) ROHS; Manufacturer: AMAZING; Manufacturer Part Number: AZ3005-01G; Package: SOD-123; LCSC Part Number: C7079241; Item Type: (TVS/ESD); ComponentLink1Description: LCSC; ComponentLink1URL: https://www.lcsc.com/product-detail/ESD-and-Surge-Protection-TVS-ESD_AMAZING-AZ3005-01G_C7079241.html
footprint SOD-123
pins: 1 A, 2 K

## AZ4024-01G
designator D?
26.7V 24V SOD-123 ESD and Surge Protection (TVS/ESD) ROHS; Manufacturer: AMAZING; Manufacturer Part Number: AZ4024-01G; Package: SOD-123; LCSC Part Number: C5571859; Item Type: (TVS/ESD); ComponentLink1Description: LCSC; ComponentLink1URL: https://www.lcsc.com/product-detail/ESD-and-Surge-Protection-TVS-ESD_AMAZING-AZ4024-01G_C5571859.html
footprint SOD-123
pins: 1 A, 2 K

## AZ4036-01G
designator D?
Clamp Ipp Tvs Diode Surface Mount SOD-123; Manufacturer: Amazing; Manufacturer Part Number: AZ4036-01G; Package: SOD-123; LCSC Part Number: -; Item Type: Diode; ComponentLink1Description: Digikey; ComponentLink1URL: https://www.digikey.com/en/products/detail/amazing/AZ4036-01G/16615419
footprint SOD-123
pins: 1 A, 2 K

## AZ5825-01F
designator ESD?
DFN1006P ESD Protection Devices ROHS; Manufacturer: TECH PUBLIC; Manufacturer Part Number: AZ5825-01F; Item Type: Diode; ComponentLink1Description: LCSC; ComponentLink1URL: https://lcsc.com/product-detail/ESD-Protection-Devices_TECH-PUBLIC-AZ5825-01F_C2905641.html; Footprint: FN1006P; LCSC Part Number: C2905641
footprint DFN1006-2L_
pins: 1 A, 2 A

## B120-E3/61T
designator D?
DIODE SCHOTTKY 20V 1A DO214AC; Manufacturer: Vishay Semiconductors; Manufacturer Part Number: B120-E3/61T; Item Type: Diodes; Supplier: Mouser; LCSC Part Number: C6863467; RoHS: Yes; Stock: 10166; Pricing: 1=0.24, 10=0.162, 50=0.162, 100=0.094, 1000=0.052, 10000=0.035 (USD); ComponentLink1URL: https://datasheet.ciiva.com/8283/b120-8283637.pdf?src-supplier=Avnet; ComponentLink1Description: https://datasheet.ciiva.com/8283/b120-8283637.pdf?src-supplier=Avnet; ComponentLink2URL: https://datasheet.ciiva.com/1240/b120-1240220.pdf?src-supplier=Newark; ComponentLink2Description: https://datasheet.ciiva.com/1240/b120-1240220.pdf?src-supplier=Newark
footprint SMA(DO-214AC)
pins: 1 K, 2 A

## B150-13-F
designator D?
DIODE SCHOTTKY 50V 1A SMA; Manufacturer: Diodes Incorporated; Manufacturer Part Number: B150-13-F; Package: SMA(DO-214AC); LCSC Part Number: C134431; Item Type: Diode
footprint SMA
pins: 1 K, 2 A

## B260A-13-F
designator D?
DIODE SCHOTTKY 60V 2A SMA; Manufacturer: Diodes; Manufacturer Part Number: B260A-13-F; Max Reverse Current: 500uA; Max Forward Surge Current (Ifsm): 50A; Value: 200pF; Forward Voltage: 700mV; Polarity: Standard; Supplier: Future Electronics; Supplier Part Number: 4129357; RoHS: Yes; Category: Rectifier Diodes; Stock: 240000; Pricing: 5000=0.0501, 15000=0.0483, 20000=0.0478, 50000=0.0463, 75000=0.0449 (USD); Mounting Technology: Surface Mount; Case/Package: SMA; Pins: 2; Weight: 0.002258oz; Min Operating Temperature: -65°C; Max Operating Temperature: 150°C; Packaging: Tape and Reel; Forward Current: 2A; Max Repetitive Reverse Voltage (Vrrm): 60V; Package Quantity: 5000; Peak Non-Repetitive Surge Current: 50A; Termination: SMD/SMT; Voltage Rating (DC): 60V; Series: -; Average Rectified Current: 2A; Current Rating: 2A; Output Current: 2A; Max Reverse Voltage (DC): 60V; Length: 4.6mm; Width: 2.92mm; Height: 2.1mm; Radiation Hardening: No; Reach SVHC Compliant: No; RoHS Compliant: Yes; Lead Free: Lead Free; ComponentLink1URL: https://datasheet.ciiva.com/27052/1589515-27052632.pdf?src-supplier=Jameco; ComponentLink1Description: https://datasheet.ciiva.com/27052/1589515-27052632.pdf?src-supplier=Jameco; ComponentLink2URL: https://datasheet.ciiva.com/26949/getdatasheetpartid-143171-26949344.pdf?src-supplier=Verical; ComponentLink2Description: https://datasheet.ciiva.com/26949/getdatasheetpartid-143171-26949344.pdf?src-supplier=Verical; ComponentLink3URL: https://datasheet.ciiva.com/8303/ds13004-8303141.pdf?src-supplier=Avnet; ComponentLink3Description: https://datasheet.ciiva.com/8303/ds13004-8303141.pdf?src-supplier=Avnet; ComponentLink4URL: https://datasheet.ciiva.com/8303/ds13004-8303029.pdf?src-supplier=Avnet; ComponentLink4Description: https://datasheet.ciiva.com/8303/ds13004-8303029.pdf?src-supplier=Avnet; LCSC Part Number: C109094; Item Type: Diode
footprint SMA
pins: 1 K, 2 A

## B340A
designator D?
40V 3A 550mV@3A SMA(DO-214AC) Schottky Barrier Diodes (SBD) ROHS; Manufacturer: FUXINSEMI; Manufacturer Part Number: B340A; Item Type: Diode; Package: SMA(DO-214AC); LCSC Part Number: C3018525; ComponentLink1Description: LCSC; ComponentLink1URL: https://www.lcsc.com/product-detail/Schottky-Barrier-Diodes-SBD_FUXINSEMI-B340A_C3018525.html
footprint SMA(DO-214AC)
pins: 1 K, 2 A

## B360-13-F
designator D?
DIODE SCHOTTKY 60V 3A SMC; Manufacturer: Diodes; Manufacturer Part Number: B360-13-F; Item Type: Rectifier Diodes; Supplier: Future Electronics; LCSC Part Number: C110487; RoHS: Yes; Stock: 378000; Pricing: 3000=0.0788, 6000=0.0733, 9000=0.0758, 15000=0.0744, 30000=0.0726, 60000=0.0698 (USD); ComponentLink1URL: https://datasheet.ciiva.com/27052/1589591-27052635.pdf?src-supplier=Jameco; ComponentLink1Description: https://datasheet.ciiva.com/27052/1589591-27052635.pdf?src-supplier=Jameco; ComponentLink2URL: https://datasheet.ciiva.com/26949/getdatasheetpartid-143397-26949358.pdf?src-supplier=Verical; ComponentLink2Description: https://datasheet.ciiva.com/26949/getdatasheetpartid-143397-26949358.pdf?src-supplier=Verical; ComponentLink3URL: https://datasheet.ciiva.com/1177/ds30923-1177481.pdf?src-supplier=Element14; ComponentLink3Description: https://datasheet.ciiva.com/1177/ds30923-1177481.pdf?src-supplier=Element14; ComponentLink4URL: https://datasheet.ciiva.com/16199/ds13005-16199637.pdf?src-supplier=Future+Electronics; ComponentLink4Description: https://datasheet.ciiva.com/16199/ds13005-16199637.pdf?src-supplier=Future+Electronics; ComponentLink5URL: https://datasheet.ciiva.com/914/ds30923-914471.pdf?src-supplier=Digikey; ComponentLink5Description: https://datasheet.ciiva.com/914/ds30923-914471.pdf?src-supplier=Digikey; ComponentLink6URL: https://datasheet.ciiva.com/914/ds30923-914472.pdf?src-supplier=Digikey; ComponentLink6Description: https://datasheet.ciiva.com/914/ds30923-914472.pdf?src-supplier=Digikey; ComponentLink7URL: https://datasheet.ciiva.com/914/ds30923-914473.pdf?src-supplier=Digikey; ComponentLink7Description: https://datasheet.ciiva.com/914/ds30923-914473.pdf?src-supplier=Digikey
footprint SMC
pins: 1 K, 2 A

## B360A-13-F
designator D?
DIODE SCHOTTKY 60V 3A SMA; Manufacturer: Diodes; Manufacturer Part Number: B360A-13-F; Max Reverse Current: 500uA; Max Forward Surge Current (Ifsm): 80A; Forward Voltage: 700mV; Polarity: Standard; Value: 200pF; Supplier: Future Electronics; LCSC Part Number: C94193; RoHS: Yes; Item Type: Diode; Stock: 1145000; Pricing: 5000=0.0567, 10000=0.0552, 15000=0.0544, 20000=0.0538, 25000=0.052 (USD); Mounting Technology: Surface Mount; Case/Package: SMA; Pins: 2; Weight: 0.002258oz; Contact Plating: Tin,Matte; Min Operating Temperature: -55°C; Max Operating Temperature: 150°C; Forward Current: 3A; Max Repetitive Reverse Voltage (Vrrm): 60V; Packaging: Tape and Reel; Peak Non-Repetitive Surge Current: 80A; Package Quantity: 5000; Average Rectified Current: 3A; Termination: SMD/SMT; Voltage Rating (DC): 60V; Current Rating: 3A; Output Current: 3A; Max Reverse Voltage (DC): 60V; Series: -; Length: 4.6mm; Width: 2.92mm; Height: 2.3mm; Radiation Hardening: No; RoHS Compliant: Yes; Reach SVHC Compliant: No; Lead Free: Lead Free; ComponentLink1URL: https://datasheet.ciiva.com/914/ds30891-914080.pdf?src-supplier=Digikey; ComponentLink1Description: https://datasheet.ciiva.com/914/ds30891-914080.pdf?src-supplier=Digikey; ComponentLink2URL: https://datasheet.ciiva.com/34302/1538902-34302361.pdf?src-supplier=Jameco; ComponentLink2Description: https://datasheet.ciiva.com/34302/1538902-34302361.pdf?src-supplier=Jameco; ComponentLink3URL: https://datasheet.ciiva.com/4244/861ds30891-4244631.pdf?src-supplier=Arrow+Electronics; ComponentLink3Description: https://datasheet.ciiva.com/4244/861ds30891-4244631.pdf?src-supplier=Arrow+Electronics; ComponentLink4URL: https://datasheet.ciiva.com/914/ds30891-914081.pdf?src-supplier=Digikey; ComponentLink4Description: https://datasheet.ciiva.com/914/ds30891-914081.pdf?src-supplier=Digikey; ComponentLink5URL: https://datasheet.ciiva.com/914/ds30891-914082.pdf?src-supplier=Digikey; ComponentLink5Description: https://datasheet.ciiva.com/914/ds30891-914082.pdf?src-supplier=Digikey; ComponentLink6URL: https://datasheet.ciiva.com/1177/ds30891-1177482.pdf?src-supplier=Element14; ComponentLink6Description: https://datasheet.ciiva.com/1177/ds30891-1177482.pdf?src-supplier=Element14; ComponentLink7URL: https://datasheet.ciiva.com/22695/1911813-22695787.pdf?src-supplier=Element14; ComponentLink7Description: https://datasheet.ciiva.com/22695/1911813-22695787.pdf?src-supplier=Element14; ComponentLink8URL: https://datasheet.ciiva.com/16199/ds13005-16199422.pdf?src-supplier=Future+Electronics; ComponentLink8Description: https://datasheet.ciiva.com/16199/ds13005-16199422.pdf?src-supplier=Future+Electronics
footprint SMA(DO-214AC)
pins: 1 K, 2 A

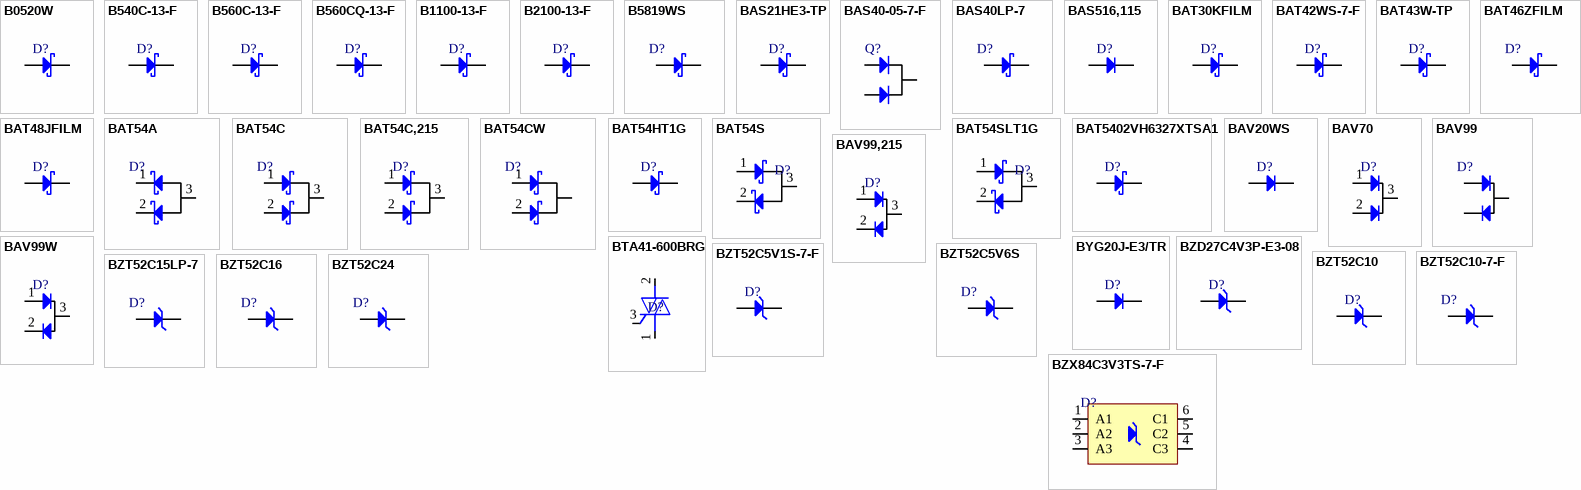
[diagram p1: symbols B0520W to BZX84C3V3TS-7-F]

## B0520W
designator D?
20V 385mV@0.5A 500mA SOD-123 Schottky Diodes ROHS; Manufacturer: SINEDEVICE; Manufacturer Part Number: B0520W; Item Type: Diode; Package: SOD-123; LCSC Part Number: C22439176; ComponentLink1Description: LCSC; ComponentLink1URL: https://www.lcsc.com/product-detail/Schottky-Diodes_SINEDEVICE-B0520W_C22439176.html
footprint SOD-123F
pins: 1 K, 2 A

## B540C-13-F
designator D?
DIODE SCHOTTKY 40V 5A SMC; Manufacturer: Diodes; Manufacturer Part Number: B540C-13-F; Max Reverse Current: 500uA; Polarity: Standard; Forward Voltage: 550mV; Max Forward Surge Current (Ifsm): 100A; Value: 300pF; Supplier: Future Electronics; Supplier Part Number: 8485369; RoHS: Yes; Category: Rectifier Diodes; Stock: 381000; Pricing: 3000=0.148, 6000=0.145, 9000=0.143, 12000=0.142, 15000=0.138 (USD); Mounting Technology: Surface Mount; Case/Package: SMC; Weight: 0.007408oz; Min Operating Temperature: -55°C; Max Operating Temperature: 125°C; Packaging: Tape and Reel; Forward Current: 5A; Max Repetitive Reverse Voltage (Vrrm): 40V; Package Quantity: 3000; Output Current: 5A; Series: -; Average Rectified Current: 5A; Termination: SMD/SMT; Voltage Rating (DC): 40V; Current Rating: 5A; Max Reverse Voltage (DC): 40V; Current: 5A; Voltage: 40V; Length: 7.11mm; Width: 6.22mm; Height: 2.5mm; Lead Free: Lead Free; RoHS Compliant: Yes; LCSC Part Number: C72264; Item Type: Diode
footprint SMC
pins: 1 K, 2 A

## B560C-13-F
designator D?
DIODE SCHOTTKY 60V 5A SMC; Manufacturer: Diodes; Manufacturer Part Number: B560C-13-F; Item Type: Rectifier Diodes; Supplier: Future Electronics; LCSC Part Number: C85100; RoHS: Yes; Stock: 846000; Pricing: 3000=0.151, 6000=0.148, 9000=0.146, 12000=0.145, 15000=0.141 (USD); ComponentLink1URL: https://datasheet.ciiva.com/27052/1538961-27052355.pdf?src-supplier=Jameco; ComponentLink1Description: https://datasheet.ciiva.com/27052/1538961-27052355.pdf?src-supplier=Jameco; ComponentLink2URL: https://datasheet.ciiva.com/16389/ds13012-16389735.pdf?src-supplier=Future+Electronics; ComponentLink2Description: https://datasheet.ciiva.com/16389/ds13012-16389735.pdf?src-supplier=Future+Electronics; ComponentLink3URL: https://datasheet.ciiva.com/15144/getdatasheetpartid-89786-15144652.pdf?src-supplier=Verical; ComponentLink3Description: https://datasheet.ciiva.com/15144/getdatasheetpartid-89786-15144652.pdf?src-supplier=Verical; ComponentLink4URL: https://datasheet.ciiva.com/1177/ds13012-1177532.pdf?src-supplier=Element14; ComponentLink4Description: https://datasheet.ciiva.com/1177/ds13012-1177532.pdf?src-supplier=Element14; ComponentLink5URL: https://datasheet.ciiva.com/914/ds13012-914985.pdf?src-supplier=Digikey; ComponentLink5Description: https://datasheet.ciiva.com/914/ds13012-914985.pdf?src-supplier=Digikey; ComponentLink6URL: https://datasheet.ciiva.com/914/ds13012-914986.pdf?src-supplier=Digikey; ComponentLink6Description: https://datasheet.ciiva.com/914/ds13012-914986.pdf?src-supplier=Digikey; ComponentLink7URL: https://datasheet.ciiva.com/914/ds13012-914987.pdf?src-supplier=Digikey; ComponentLink7Description: https://datasheet.ciiva.com/914/ds13012-914987.pdf?src-supplier=Digikey
footprint SMC
pins: 1 K, 2 A

## B560CQ-13-F
designator D?
DIODE SCHOTTKY 60V 5A SMC; Manufacturer: Diodes; Manufacturer Part Number: B560CQ-13-F; Supplier 1: Digikey; RoHS: Yes; Item Type: Diode; Stock 1: 31887; Pricing 1: 1=0.6, 10=0.523, 100=0.3621, 500=0.30252, 1000=0.25747 (USD); Forward Current: 5A; ComponentLink1URL: https://www.diodes.com/assets/Datasheets/B520CQ-B560CQ.pdf?src-supplier=Digikey; ComponentLink1Description: https://www.diodes.com/assets/Datasheets/B520CQ-B560CQ.pdf?src-supplier=Digikey; ComponentLink2URL: https://www.diodes.com/assets/Datasheets/B520CQ_B560CQ.pdf?src-supplier=Digikey; ComponentLink2Description: https://www.diodes.com/assets/Datasheets/B520CQ_B560CQ.pdf?src-supplier=Digikey; Supplier Part Number 1: B560CQ-13-FDICT-ND; LCSC Part Number: C460781
footprint SMC
pins: 1 K, 2 A

## B1100-13-F
designator D?
DIODE SCHOTTKY 100V 1A SMA; Manufacturer: Diodes; Manufacturer Part Number: B1100-13-F; Max Reverse Current: 500uA; Max Forward Surge Current (Ifsm): 30A; Forward Voltage: 790mV; Polarity: Standard; Value: 80pF; Reverse Voltage: 70V; Supplier: Future Electronics; Supplier Part Number: 7349525; RoHS: Yes; Item Type: Diode; Stock: 1235000; Pricing: 5000=0.0823, 10000=0.0803, 15000=0.0791, 25000=0.0777, 50000=0.0747 (USD); Mounting Technology: Surface Mount; Case/Package: SMA; Pins: 2; Weight: 0.002258oz; Min Operating Temperature: -65°C; Max Operating Temperature: 150°C; Forward Current: 1A; Max Repetitive Reverse Voltage (Vrrm): 100V; Packaging: Tape and Reel; Peak Non-Repetitive Surge Current: 30A; Package Quantity: 5000; Average Rectified Current: 1A; Termination: SMD/SMT; Voltage Rating (DC): 100V; Current Rating: 1A; Output Current: 1A; Current: 1A; Voltage: 100V; Max Reverse Voltage (DC): 100V; Series: -; Length: 4.6mm; Width: 2.92mm; Height: 2.1mm; Radiation Hardening: No; Reach SVHC Compliant: No; Lead Free: Lead Free; RoHS Compliant: Yes; ComponentLink1URL: https://datasheet.ciiva.com/913/ds30018-913296.pdf?src-supplier=Digikey; ComponentLink1Description: https://datasheet.ciiva.com/913/ds30018-913296.pdf?src-supplier=Digikey; ComponentLink2URL: https://datasheet.ciiva.com/34302/1538620-34302353.pdf?src-supplier=Jameco; ComponentLink2Description: https://datasheet.ciiva.com/34302/1538620-34302353.pdf?src-supplier=Jameco; ComponentLink3URL: https://datasheet.ciiva.com/22695/1911849-22695781.pdf?src-supplier=Element14; ComponentLink3Description: https://datasheet.ciiva.com/22695/1911849-22695781.pdf?src-supplier=Element14; ComponentLink4URL: https://datasheet.ciiva.com/16393/ds30018-16393487.pdf?src-supplier=Future+Electronics; ComponentLink4Description: https://datasheet.ciiva.com/16393/ds30018-16393487.pdf?src-supplier=Future+Electronics; ComponentLink5URL: https://datasheet.ciiva.com/15144/getdatasheetpartid-91796-15144698.pdf?src-supplier=Verical; ComponentLink5Description: https://datasheet.ciiva.com/15144/getdatasheetpartid-91796-15144698.pdf?src-supplier=Verical
footprint SMA(DO-214AC)
pins: 1 K, 2 A